# Altium schematic symbol library MCRJ332768F1220HOW.SchLib: 1 symbol
Pins are listed as number, name and electrical type; pins without a type are passive.

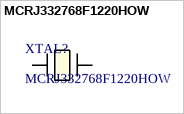
[diagram p0: symbol MCRJ332768F1220HOW]

## MCRJ332768F1220HOW
designator XTAL?
No Description Available; Manufacturer_Name: Multicomp; Copyright: Copyright (C) 2026 Ultra Librarian. All rights reserved.; Manufacturer_Part_Number: MCRJ332768F1220HOW
footprint CRYSTAL_MCRJ332768F1220HOW_MTC
pins: 1, 2